# Altium schematic symbol library HeatSink.SchLib: 3 symbols
Pins are listed as number, name and electrical type; pins without a type are passive.

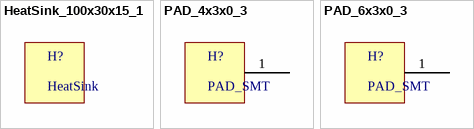
[diagram p0: symbols HeatSink_100x30x15_1 to PAD_6x3x0_3]

## HeatSink_100x30x15_1
designator H?, comment HeatSink
HeatSink_100x30x15; Code: N/A
footprint AL_100x30x15

## PAD_4x3x0_3
designator H?, comment PAD_SMT
PAD_4x3x0_3; Code: N/A
footprint PAD_CELL
pins: 1

## PAD_6x3x0_3
designator H?, comment PAD_SMT
PAD_6x3x0_3; Code: N/A
footprint PAD_CELL_3X6
pins: 1